# Altium schematic symbol library USB_Hub.SchLib: 12 symbols
Pins are listed as number, name and electrical type; pins without a type are passive.

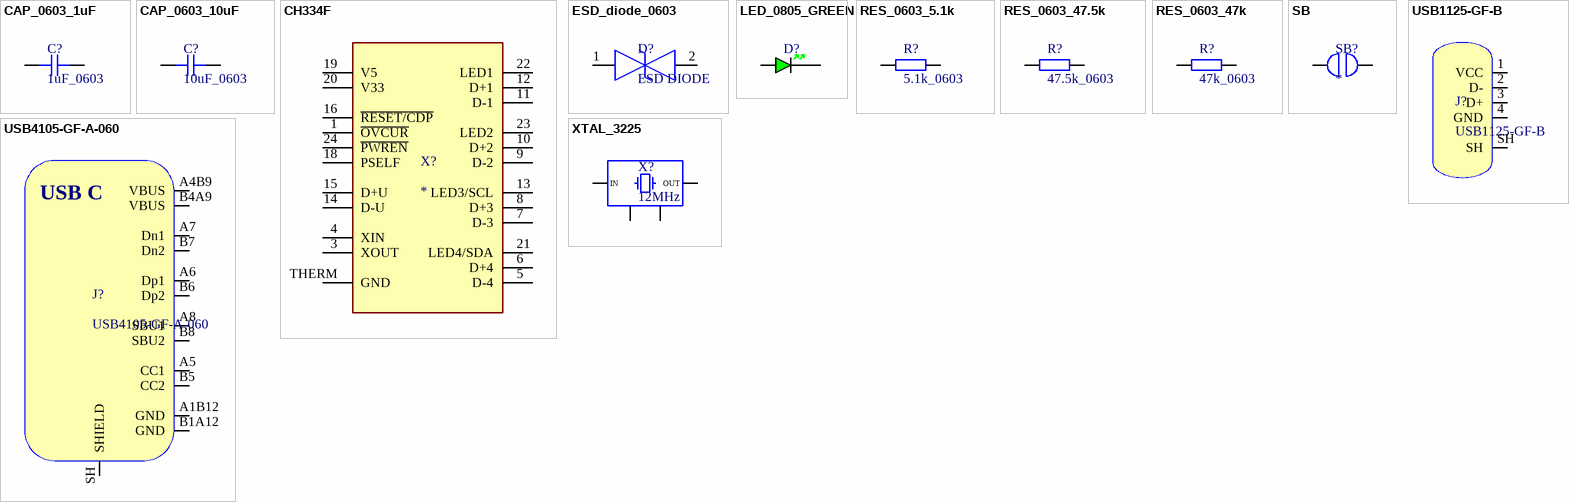
[diagram p0: symbols CAP_0603_1uF to XTAL_3225]

## CAP_0603_1uF
designator C?, comment 1uF_0603
CAP CER 1uF 25V X5R 0603; Manufacturer: *; Manufacturer Part Number: *; Distributor Link: *; LCSC part number: C29936; Rating: *; Dielectric: *
footprint CAP_0603
pins: 1, 2

## CAP_0603_10uF
designator C?, comment 10uF_0603
10uF ±20% 6.3V Ceramic Capacitor X5R 0603; Manufacturer: *; Manufacturer Part Number: *; Distributor Link: *; LCSC part number: C1691; Rating: *; Dielectric: *
footprint CAP_0603
pins: 1, 2

## CH334F
designator X?
Quad side leadless 24-pin; MF: WCH; MP: CH334F; SnapEDA_Link: https://www.snapeda.com/parts/CH334F/WCH/view-part/?ref=snap; Package: Package; Value: *; Check_prices: https://www.snapeda.com/parts/CH334F/WCH/view-part/?ref=eda; LCSC part number: C5187527
footprint QFN24_4MM
pins: 1 ~{OVCUR}, 3 XOUT, 4 XIN, 5 D-4, 6 D+4, 7 D-3, 8 D+3, 9 D-2, 10 D+2, 11 D-1, 12 D+1, 13 LED3/SCL, 14 D-U, 15 D+U, 16 ~{RESET/CDP}, 18 PSELF, 19 V5, 20 V33, 21 LED4/SDA, 22 LED1, 23 LED2, 24 ~{PWREN}, THERM GND

## ESD_diode_0603
designator D?, comment ESD DIODE
ESD DIODE 24VWM 100VC 0603; LCSC part number: C5355505
footprint RES_0603
pins: 1, 2

## LED_0805_GREEN
designator D?, comment GREEN  (value not drawn)
LED 0805 GREEN SMD; Manufacturer: *; Manufacturer Part Number: *; Distributor Link: *; LCSC part number: C2971978
footprint LED_0805_GREEN
pins: A, K

## RES_0603_5.1k
designator R?, comment 5.1k_0603
RES 5.1kΩ ±1% 125mW 0603; LCSC part number: C23186
footprint RES_0603
pins: 1, 2

## RES_0603_47.5k
designator R?, comment 47.5k_0603
47.5kΩ ±1% 100mW 0603 Thick Film Resistor; LCSC part number: C2933225
footprint RES_0603
pins: 1, 2

## RES_0603_47k
designator R?, comment 47k_0603
47kΩ ±5% 100mW 0603 Thick Film Resistor; LCSC part number: C2907173
footprint RES_0603
pins: 1, 2

## SB
designator SB?
footprint SB
pins: 1, 2

## USB1125-GF-B
designator J?
USB Connector Type A 2.0 Through-Hole; Manufacturer: GCT; Manufacturer Part Number: USB1125-GF-B; LCSC part number: C2345
footprint USB1125-GF-B
pins: 1 VCC, 2 D-, 3 D+, 4 GND, SH

## USB4105-GF-A-060
designator J?
USB Connector Type C SMT 12 Pin; Manufacturer: GCT; Manufacturer Part Number: USB4105-GF-A-060; Distributor Link: https://eu.mouser.com/ProductDetail/GCT/USB4105-GF-A-060?qs=QNEnbhJQKvY2mocwNJzgfA%3D%3D; LCSC part number: C5178539
footprint USB4105-GF-A-060
pins: A1B12 GND, A4B9 VBUS, A5 CC1, A6 Dp1, A7 Dn1, A8 SBU1, B1A12 GND, B4A9 VBUS, B5 CC2, B6 Dp2, B7 Dn2, B8 SBU2, SH SHIELD
text: USB C

## XTAL_3225
designator X?, comment 12MHz
CRYSTAL 12MHz 20pF SMD; Distributor Link: *; LCSC part number: C9002
footprint XTAL_3225
pins: 1, 2, 3, 4
text: IN; OUT